# Altium schematic symbol library Centralize.SchLib: 1081 symbols (part 15 of 26)
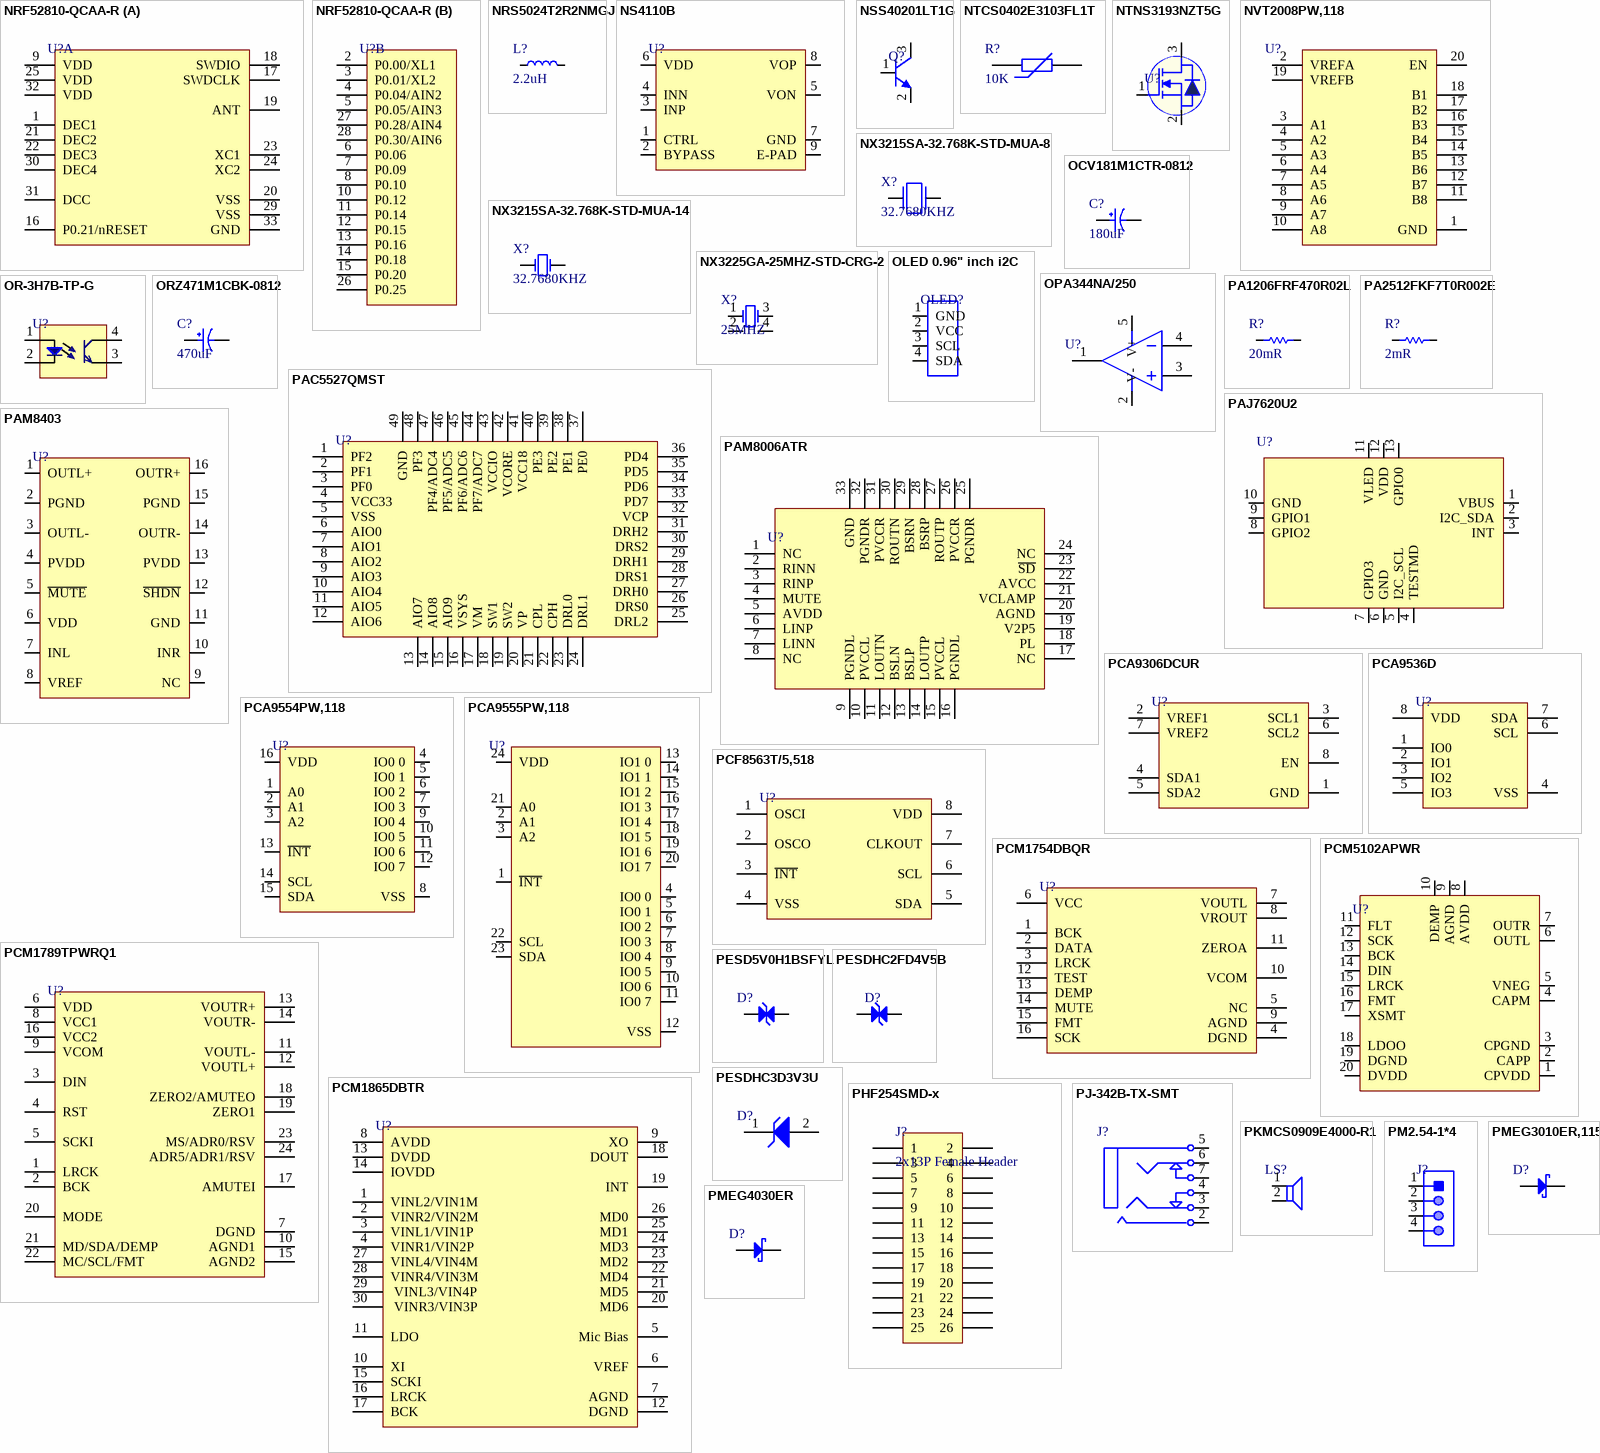
[diagram p61: symbols NRF52810-QCAA-R to PMEG4030ER]

## PCA9555PW,118
designator U?
IC XPND 400KHZ I2C SMBUS 24TSSOP; Manufacturer: NXP Semiconductors; Manufacturer Part Number: PCA9555PW,118; Number of I/Os: 16; Interface: I2C,SMBus,Serial; Output Current: 50mA; Min Supply Voltage: 2.3V; Max Supply Voltage: 5.5V; Operating Supply Current: 135uA; Max Power Dissipation: 200mW; Output Voltage: 4.1V; Supply Current: 160mA; Supplier 1: Arrow Electronics; RoHS: Yes; Category: Interface ICs; Stock 1: 2500; Pricing 1: 2500=1.7266, 5000=1.3406, 10000=1.3272, 25000=1.3139, 30000=1.3008, 50000=1.2878 (USD); Mounting Technology: Surface Mount; Case/Package: TSSOP; Pins: 24; Min Operating Temperature: -40°C; Max Operating Temperature: 85°C; Packaging: Tape and Reel; Package Quantity: 1; Frequency: 400kHz; Clock Frequency: 400kHz; Series: -; Nominal Supply Voltage: 5.5V; Radiation Hardening: No; Reach SVHC Compliant: No; Lead Free: Lead Free; RoHS Compliant: Yes; ComponentLink1URL: https://datasheet.ciiva.com/15134/getdatasheetpartid-148982-15134333.pdf?src-supplier=Verical; ComponentLink1Description: https://datasheet.ciiva.com/15134/getdatasheetpartid-148982-15134333.pdf?src-supplier=Verical; ComponentLink2URL: https://datasheet.ciiva.com/1780/pca9555-1780068.pdf?src-supplier=Digi-Key; ComponentLink2Description: https://datasheet.ciiva.com/1780/pca9555-1780068.pdf?src-supplier=Digi-Key; ComponentLink3URL: https://datasheet.ciiva.com/1504/1090559-1504901.pdf?src-supplier=Farnell; ComponentLink3Description: https://datasheet.ciiva.com/1504/1090559-1504901.pdf?src-supplier=Farnell; ComponentLink4URL: https://datasheet.ciiva.com/1780/pca9555-1780069.pdf?src-supplier=Digi-Key; ComponentLink4Description: https://datasheet.ciiva.com/1780/pca9555-1780069.pdf?src-supplier=Digi-Key; ComponentLink5URL: https://datasheet.ciiva.com/1780/pca9555-1780070.pdf?src-supplier=Digi-Key; ComponentLink5Description: https://datasheet.ciiva.com/1780/pca9555-1780070.pdf?src-supplier=Digi-Key; ComponentLink6URL: https://datasheet.ciiva.com/1495/1090559-1495945.pdf?src-supplier=Element14; ComponentLink6Description: https://datasheet.ciiva.com/1495/1090559-1495945.pdf?src-supplier=Element14; ComponentLink7URL: https://datasheet.ciiva.com/8122/pca9555-8122281.pdf?src-supplier=Avnet; ComponentLink7Description: https://datasheet.ciiva.com/8122/pca9555-8122281.pdf?src-supplier=Avnet; ComponentLink8URL: https://datasheet.ciiva.com/46381/1090559-46381881.pdf?src-supplier=Element14; ComponentLink8Description: https://datasheet.ciiva.com/46381/1090559-46381881.pdf?src-supplier=Element14; ComponentLink9URL: https://datasheet.ciiva.com/4826/pca9555-4826810.pdf?src-supplier=Mouser; ComponentLink9Description: https://datasheet.ciiva.com/4826/pca9555-4826810.pdf?src-supplier=Mouser; Supplier Part Number 1: PCA9555PW,118; LCSC Part Number: C128392; Item Type: IC
footprint 24-TSSOP_
pins: 1 ~{INT}, 2 A1, 3 A2, 4 IO0 0, 5 IO0 1, 6 IO0 2, 7 IO0 3, 8 IO0 4, 9 IO0 5, 10 IO0 6, 11 IO0 7, 12 VSS, 13 IO1 0, 14 IO1 1, 15 IO1 2, 16 IO1 3, 17 IO1 4, 18 IO1 5, 19 IO1 6, 20 IO1 7, 21 A0, 22 SCL, 23 SDA, 24 VDD

## PCF8563T/5,518
designator U?
IC RTC CLK/CALENDAR I2C 8-SOIC; Manufacturer: NXP Semiconductors; Manufacturer Part Number: PCF8563T/5,518; Time Format: HH:MM:SS; Max Supply Voltage: 5.5V; Min Supply Voltage: 1.8V; Logic Function: Clock; Supplier 1: Newark; RoHS: Yes; Category: Interface ICs; Pricing 1: 1=1.20000, 10=1.07000, 25=1.01000, 50=0.92400, 100=0.83300, 250=0.77800, 500=0.69000 (USD); Mount: Surface Mount; Case/Package: SO; Number of Pins: 8; Contact Plating: Gold; Min Operating Temperature: -40°C; Max Operating Temperature: 85°C; Packaging: Tape and Reel; Interface: I2C; Package Quantity: 2500; Supply Voltage-Nom: 5.5V; Radiation Hardening: No; Lead Free: Lead Free; Temperature Grade: INDUSTRIAL; RoHS Compliant: Yes; ComponentLink1URL: https://datasheet.ciiva.com/1238/pcf8563-1238728.pdf?src-supplier=Digi-Key; ComponentLink1Description: https://datasheet.ciiva.com/1238/pcf8563-1238728.pdf?src-supplier=Digi-Key; ComponentLink2URL: https://datasheet.ciiva.com/1238/pcf8563-1238727.pdf?src-supplier=Digi-Key; ComponentLink2Description: https://datasheet.ciiva.com/1238/pcf8563-1238727.pdf?src-supplier=Digi-Key; ComponentLink3URL: https://datasheet.ciiva.com/1238/pcf8563-1238773.pdf?src-supplier=Digi-Key; ComponentLink3Description: https://datasheet.ciiva.com/1238/pcf8563-1238773.pdf?src-supplier=Digi-Key; ComponentLink4URL: https://datasheet.ciiva.com/8145/pcf8563-8145180.pdf?src-supplier=Avnet; ComponentLink4Description: https://datasheet.ciiva.com/8145/pcf8563-8145180.pdf?src-supplier=Avnet; ComponentLink5URL: https://datasheet.ciiva.com/16287/pcf8563-16287110.pdf?src-supplier=Future+Electronics; ComponentLink5Description: https://datasheet.ciiva.com/16287/pcf8563-16287110.pdf?src-supplier=Future+Electronics; Supplier Part Number 1: 31AC6855; Item Type: IC
footprint SOIC-8
pins: 1 OSCI, 2 OSCO, 3 ~{INT}, 4 VSS, 5 SDA, 6 SCL, 7 CLKOUT, 8 VDD

## PCM1754DBQR
designator U?
IC DAC/AUDIO 24BIT 200K 16SSOP; Manufacturer: Texas Instruments; Manufacturer Part Number: PCM1754DBQR; Number of DAC Channels: 2; Operating Supply Voltage: 5V; Max Power Dissipation: 105mW; Interface: Serial,3-WIRE; Number of Bits: 24; Sampling Rate: 192000S/s; Resolution: 24b; Signal to Noise Ratio (SNR): 106dB; Supply Type: Single; Conversion Rate: 192KS/s; Nominal Supply Current: 30mA; Power Consumption: 80mW; Number of Analog Inputs: 0; Output Type: Voltage; Min Supply Voltage: 4.5V; Max Supply Voltage: 5.5V; Integral Nonlinearity (INL): 0.5LSB; Polarity: Bipolar; Supplier 1: Mouser; RoHS: Yes; Category: Amplifiers - Audio; Stock 1: 908; Pricing 1: 1=2.14000, 10=1.93000, 25=1.82000, 50=1.82000, 100=1.55000, 250=1.46000, 500=1.28000, 1000=1.06000, 10000=1.06000 (USD); Mount: Surface Mount; Case/Package: SSOP; Number of Pins: 16; Weight: 0.002603oz; Contact Plating: Gold; Min Operating Temperature: -40°C; Max Operating Temperature: 85°C; Packaging: Tape and Reel; Number of Channels: 2; Package Quantity: 2000; Number of Converters: 2; Number of Analog Outputs: 2; Series: PCM1754; Output Polarity: Bipolar; Length: 5mm; Width: 4mm; Height: 1.5mm; Radiation Hardening: No; Lead Free: Lead Free; RoHS Compliant: Yes; ComponentLink1URL: https://datasheet.ciiva.com/41460/001186173-da-01-en-ic-dac-24bit-mon-pcm1754dbqr-ssop-16-tid-41460109.pdf?src-supplier=Conrad; ComponentLink1Description: https://datasheet.ciiva.com/41460/001186173-da-01-en-ic-dac-24bit-mon-pcm1754dbqr-ssop-16-tid-41460109.pdf?src-supplier=Conrad; ComponentLink2URL: https://datasheet.ciiva.com/1388/pcm1753-1388404.pdf?src-supplier=Digi-Key; ComponentLink2Description: https://datasheet.ciiva.com/1388/pcm1753-1388404.pdf?src-supplier=Digi-Key; ComponentLink3URL: https://datasheet.ciiva.com/1388/pcm1753-1388403.pdf?src-supplier=Digi-Key; ComponentLink3Description: https://datasheet.ciiva.com/1388/pcm1753-1388403.pdf?src-supplier=Digi-Key; ComponentLink4URL: https://datasheet.ciiva.com/1388/pcm1753-1388405.pdf?src-supplier=Digi-Key; ComponentLink4Description: https://datasheet.ciiva.com/1388/pcm1753-1388405.pdf?src-supplier=Digi-Key; ComponentLink5URL: https://datasheet.ciiva.com/15146/getdatasheetpartid-213919-15146955.pdf?src-supplier=Verical; ComponentLink5Description: https://datasheet.ciiva.com/15146/getdatasheetpartid-213919-15146955.pdf?src-supplier=Verical; Supplier Part Number 1: 595-PCM1754DBQR; Item Type: IC
footprint 16-SSOP
pins: 1 BCK, 2 DATA, 3 LRCK, 4 DGND, 5 NC, 6 VCC, 7 VOUTL, 8 VROUT, 9 AGND, 10 VCOM, 11 ZEROA, 12 TEST, 13 DEMP, 14 MUTE, 15 FMT, 16 SCK

## PCM1789TPWRQ1
designator U?
IC DAC/AUDIO 24BIT 192K 24TSSOP; Manufacturer: Texas Instruments; Manufacturer Part Number: PCM1789TPWRQ1; Number of Channels: 2; Operating Supply Voltage: 5V; Min Supply Voltage: 4.5V; Max Supply Voltage: 5.5V; Interface: I2C,SPI,Serial,3-WIRE; Max Power Dissipation: 239mW; Number of Bits: 24; Resolution: 24b; Supply Type: Analog,Digital; Conversion Rate: 192KS/s; Power Consumption: 154mW; Number of Analog Inputs: 0; Output Type: Voltage; Supplier 1: Digi-Key; RoHS: Yes; Category: Amplifiers - Audio; Mount: Surface Mount; Case/Package: TSSOP; Number of Pins: 24; Min Operating Temperature: -40°C; Max Operating Temperature: 105°C; Packaging: Tape and Reel; Number of DAC Channels: 2; Package Quantity: 2000; Number of Converters: 2; Number of Analog Outputs: 2; Series: PCM1789-Q1; Lead Free: Lead Free; RoHS Compliant: Yes; ComponentLink1URL: https://datasheet.ciiva.com/1389/pcm1789-q1-1389256.pdf?src-supplier=Digi-Key; ComponentLink1Description: https://datasheet.ciiva.com/1389/pcm1789-q1-1389256.pdf?src-supplier=Digi-Key; ComponentLink2URL: https://datasheet.ciiva.com/14255/sbas546-14255107.pdf?src-supplier=Avnet; ComponentLink2Description: https://datasheet.ciiva.com/14255/sbas546-14255107.pdf?src-supplier=Avnet; Supplier Part Number 1: 296-28413-1-ND; LCSC Part Number: C2864058; Item Type: IC
footprint 24-TSSOP_
pins: 1 LRCK, 2 BCK, 3 DIN, 4 RST, 5 SCKI, 6 VDD, 7 DGND, 8 VCC1, 9 VCOM, 10 AGND1, 11 VOUTL-, 12 VOUTL+, 13 VOUTR+, 14 VOUTR-, 15 AGND2, 16 VCC2, 17 AMUTEI, 18 ZERO2/AMUTEO, 19 ZERO1, 20 MODE, 21 MD/SDA/DEMP, 22 MC/SCL/FMT, 23 MS/ADR0/RSV, 24 ADR5/ADR1/RSV

## PCM1865DBTR
designator U?
IC ADC/AUDIO 24BIT 192K 30TSSOP; Manufacturer: Texas Instruments; Manufacturer Part Number: PCM1865DBTR; Interface: I2C,SPI,Serial; Operating Supply Voltage: 3.3V; Sampling Rate: 192KS/s; Resolution: 24b; Operating Supply Current: 31mA; Supply Type: Single; Number of A/D Converters: 4; Power Consumption: 145mW; Max Supply Voltage: 3.6V; Min Supply Voltage: 3V; Number of Analog Inputs: 8; Number of DAC Channels: 0; Supplier 1: Mouser; RoHS: Yes; Category: Amplifiers - Audio; Pricing 1: 1=10.72000, 10=9.69000, 25=9.23000, 50=9.23000, 100=8.02000, 250=7.66000, 500=6.98000, 1000=6.54000, 10000=6.54000 (USD); Mount: Surface Mount; Case/Package: TSSOP; Number of Pins: 30; Weight: 0.003439oz; Contact Plating: Gold; Min Operating Temperature: -40°C; Max Operating Temperature: 125°C; Package Quantity: 2000; Packaging: Tape and Reel; Number of ADC Channels: 4; Lead Free: Lead Free; RoHS Compliant: Yes; ComponentLink1URL: https://datasheet.ciiva.com/48474/pcm1861-48474798.pdf?src-supplier=Avnet; ComponentLink1Description: https://datasheet.ciiva.com/48474/pcm1861-48474798.pdf?src-supplier=Avnet; ComponentLink2URL: https://datasheet.ciiva.com/29699/pcm1861-29699238.pdf?src-supplier=Digi-Key; ComponentLink2Description: https://datasheet.ciiva.com/29699/pcm1861-29699238.pdf?src-supplier=Digi-Key; Supplier Part Number 1: 595-PCM1865DBTR; LCSC Part Number: C181312
footprint TSSOP-30
pins: 1 VINL2/VIN1M, 2 VINR2/VIN2M, 3 VINL1/VIN1P, 4 VINR1/VIN2P, 5 Mic Bias, 6 VREF, 7 AGND, 8 AVDD, 9 XO, 10 XI, 11 LDO, 12 DGND, 13 DVDD, 14 IOVDD, 15 SCKI, 16 LRCK, 17 BCK, 18 DOUT, 19 INT, 20 MD6, 21 MD5, 22 MD4, 23 MD2, 24 MD3, 25 MD1, 26 MD0, 27 VINL4/VIN4M, 28 VINR4/VIN3M, 29  VINL3/VIN4P, 30  VINR3/VIN3P

## PCM5102APWR
designator U?
IC DAC 16/24/32BIT 384K 20TSSOP; Manufacturer: Texas Instruments; Manufacturer Part Number: PCM5102APWR; Supplier: Mouser; Supplier Part Number: 595-PCM5102APWR; RoHS: Yes; Category: Digital to Analog Converters (DACs); Stock: 2740; Pricing: 1=5.76, 10=4.87, 50=4.87, 100=4.1, 1000=3.13, 10000=2.65 (USD); ComponentLink1URL: https://datasheet.ciiva.com/24021/slas859a-261040-24021907.pdf?src-supplier=Mouser; ComponentLink1Description: https://datasheet.ciiva.com/24021/slas859a-261040-24021907.pdf?src-supplier=Mouser; ComponentLink2URL: https://datasheet.ciiva.com/29648/pcm5102a-29648362.pdf?src-supplier=Digi-Key; ComponentLink2Description: https://datasheet.ciiva.com/29648/pcm5102a-29648362.pdf?src-supplier=Digi-Key; ComponentLink3URL: https://datasheet.ciiva.com/6673/pcm5102a-6673611.pdf?src-supplier=Digi-Key; ComponentLink3Description: https://datasheet.ciiva.com/6673/pcm5102a-6673611.pdf?src-supplier=Digi-Key; LCSC Part Number: C107671; Item Type: IC
footprint TSSOP-20
pins: 1 CPVDD, 2 CAPP, 3 CPGND, 4 CAPM, 5 VNEG, 6 OUTL, 7 OUTR, 8 AVDD, 9 AGND, 10 DEMP, 11 FLT, 12 SCK, 13 BCK, 14 DIN, 15 LRCK, 16 FMT, 17 XSMT, 18 LDOO, 19 DGND, 20 DVDD

## PESD5V0H1BSFYL
designator D?
TVS DIODE 5VWM 6.3VC DSN0603-2; Manufacturer: Nexperia; Manufacturer Part Number: PESD5V0H1BSFYL; Supplier 1: Avnet; RoHS: Yes; Category: ESD and Circuit Protection ICs; Stock 1: 9000; Pricing 1: 18000=0.06453, 36000=0.06278, 54000=0.06104, 90000=0.05930, 180000=0.05755, 900000=0.05581, 1800000=0.05406 (USD); RoHS Compliant: Yes; ComponentLink1URL: http://www.farnell.com/datasheets/1961312.pdf?src-supplier=Farnell; ComponentLink1Description: http://www.farnell.com/datasheets/1961312.pdf?src-supplier=Farnell; ComponentLink2URL: https://assets.nexperia.com/documents/data-sheet/PESD5V0H1BSF.pdf?src-supplier=Digi-Key; ComponentLink2Description: https://assets.nexperia.com/documents/data-sheet/PESD5V0H1BSF.pdf?src-supplier=Digi-Key; ComponentLink3URL: http://www.farnell.com/datasheets/1961312.pdf?src-supplier=Newark; ComponentLink3Description: http://www.farnell.com/datasheets/1961312.pdf?src-supplier=Newark; Supplier Part Number 1: PESD5V0H1BSFYL; LCSC Part Number: C477989; Item Type: Diode
footprint DSN0603-2
pins: 1 A, 2 A

## PESDHC2FD4V5B
designator D?
12V 30A 4.5V Bi-Directional DFN1006 ESD Protection Devices ROHS; Manufacturer: Shanghai Prisemi Elec; Manufacturer Part Number: PESDHC2FD4V5B; Item Type: Diode; Package: DFN1006; LCSC Part Number: C110686; ComponentLink1Description: LCSC; ComponentLink1URL: https://www.lcsc.com/product-detail/ESD-Protection-Devices_Shanghai-Prisemi-Elec-PESDHC2FD4V5B_C110686.html
footprint DFN1006-2L_
pins: 1 A, 2 A

## PESDHC3D3V3U
designator D?
15A@8/20us 9V 5V 3.3V Unidirectional SOD-323 TVS ROHS; Manufacturer: Shanghai Prisemi Elec; Manufacturer Part Number: PESDHC3D3V3U; Item Type: Diode; Package: SOD-323; LCSC Part Number: C496538; ComponentLink1Description: LCSC; ComponentLink1URL: https://www.lcsc.com/product-detail/TVS_Shanghai-Prisemi-Elec-PESDHC3D3V3U_C496538.html
footprint SOD-323
pins: 1, 2

## PHF254SMD-x
designator J?, comment 2x13P Female Header
P=2.54mm Female Headers,SMD,ROHS; Manufacturer: RTLECS; Manufacturer Part Number: PHF254SMD-x; Value: Custom; Package: Custom; ComponentLink1Description: Aliexpress; ComponentLink1URL: https://vi.aliexpress.com/i/32798959899.html?gatewayAdapt=glo2vnm; Item Type: Header
footprint PHF254SMD-x_
pins: 1, 2, 3, 4, 5, 6, 7, 8, 9, 10, 11, 12, 13, 14, 15, 16, 17, 18, 19, 20, 21, 22, 23, 24, 25, 26

## PJ-342B-TX-SMT
designator J?
-20℃~+70℃ 3.5mm headphone jack 235℃ 12V 0.5A SMD Audio Connectors ROHS; Manufacturer: XKB Connectivity; Manufacturer Part Number: PJ-342B-TX-SMT; Footprint: Custom; ComponentLink1Description: LCSC; ComponentLink1URL: https://www.lcsc.com/product-detail/Audio-Connectors_XKB-Connectivity-PJ-342B-TX-SMT_C388632.html; LCSC Part Number: C388632
footprint PJ-342B-TX-SMT_
pins: 2, 3, 4, 5, 6, 7

## PKMCS0909E4000-R1
designator LS?
BUZZER PIEZO 1.5V 9X9MM SMD; Manufacturer: Murata; Manufacturer Part Number: PKMCS0909E4000-R1; Supplier: Rs; Supplier Part Number: 9010898P; RoHS: Yes; Category: Buzzers; Stock: 4400; Pricing: 50=0.646, 100=0.598, 250=0.55, 500=0.504 (GBP); ComponentLink1URL: https://datasheet.ciiva.com/24244/pkmcs0909e4000-r1-304946-24244386.pdf?src-supplier=Mouser; ComponentLink1Description: https://datasheet.ciiva.com/24244/pkmcs0909e4000-r1-304946-24244386.pdf?src-supplier=Mouser; Item Type: BUZZER
footprint PKMCS0909E4000-R1
pins: 1 +, 2 -

## PM2.54-1*4
designator J?
2mm 2.54mm Plugin 2.5A -40℃~+105℃ Straight 1x4P Top 8.5mm 4 Square Hole Plugin,P=2.54mm Female Headers ROHS; Manufacturer: ZHOURI; Manufacturer Part Number: PM2.54-1*4; Package: Plugin,P=2.54mm; LCSC Part Number: C5116530; Item Type: Female Header; ComponentLink1Description: LCSC; ComponentLink1URL: https://www.lcsc.com/product-detail/span-style-background-color-ff0-Female-span-Headers_ZHOURI-PM2-54-1-4_C5116530.html
footprint HDR1X4 Female
pins: 1, 2, 3, 4

## PMEG3010ER,115
designator D?
DIODE SCHOTTKY 30V 1A SOD123W; Manufacturer: Nexperia; Manufacturer Part Number: PMEG3010ER,115; Supplier 1: Digi-Key; Stock 1: 72983; Pricing 1: 1=0.35, 10=0.282, 25=0.258, 100=0.162, 250=0.1602, 500=0.15, 1000=0.102 (USD); Supplier Part Number 1: 1727-5201-1-ND; LCSC Part Number: C456106
footprint SOD-123W (DIODE SCHOTTKY 30V 1A SOD123W)
pins: 1 A, 2 K

## PMEG4030ER
designator D?
SOD-123FL Schottky Barrier Diodes (SBD) ROHS; Manufacturer: Shikues; Manufacturer Part Number: PMEG4030ER; Item Type: Diode; Package: SOD-123FL; LCSC Part Number: C5366303; ComponentLink1Description: LCSC; ComponentLink1URL: https://www.lcsc.com/product-detail/Schottky-Barrier-Diodes-SBD_Shikues-PMEG4030ER_C5366303.html
footprint SOD-123FL
pins: 1 K, 2 A

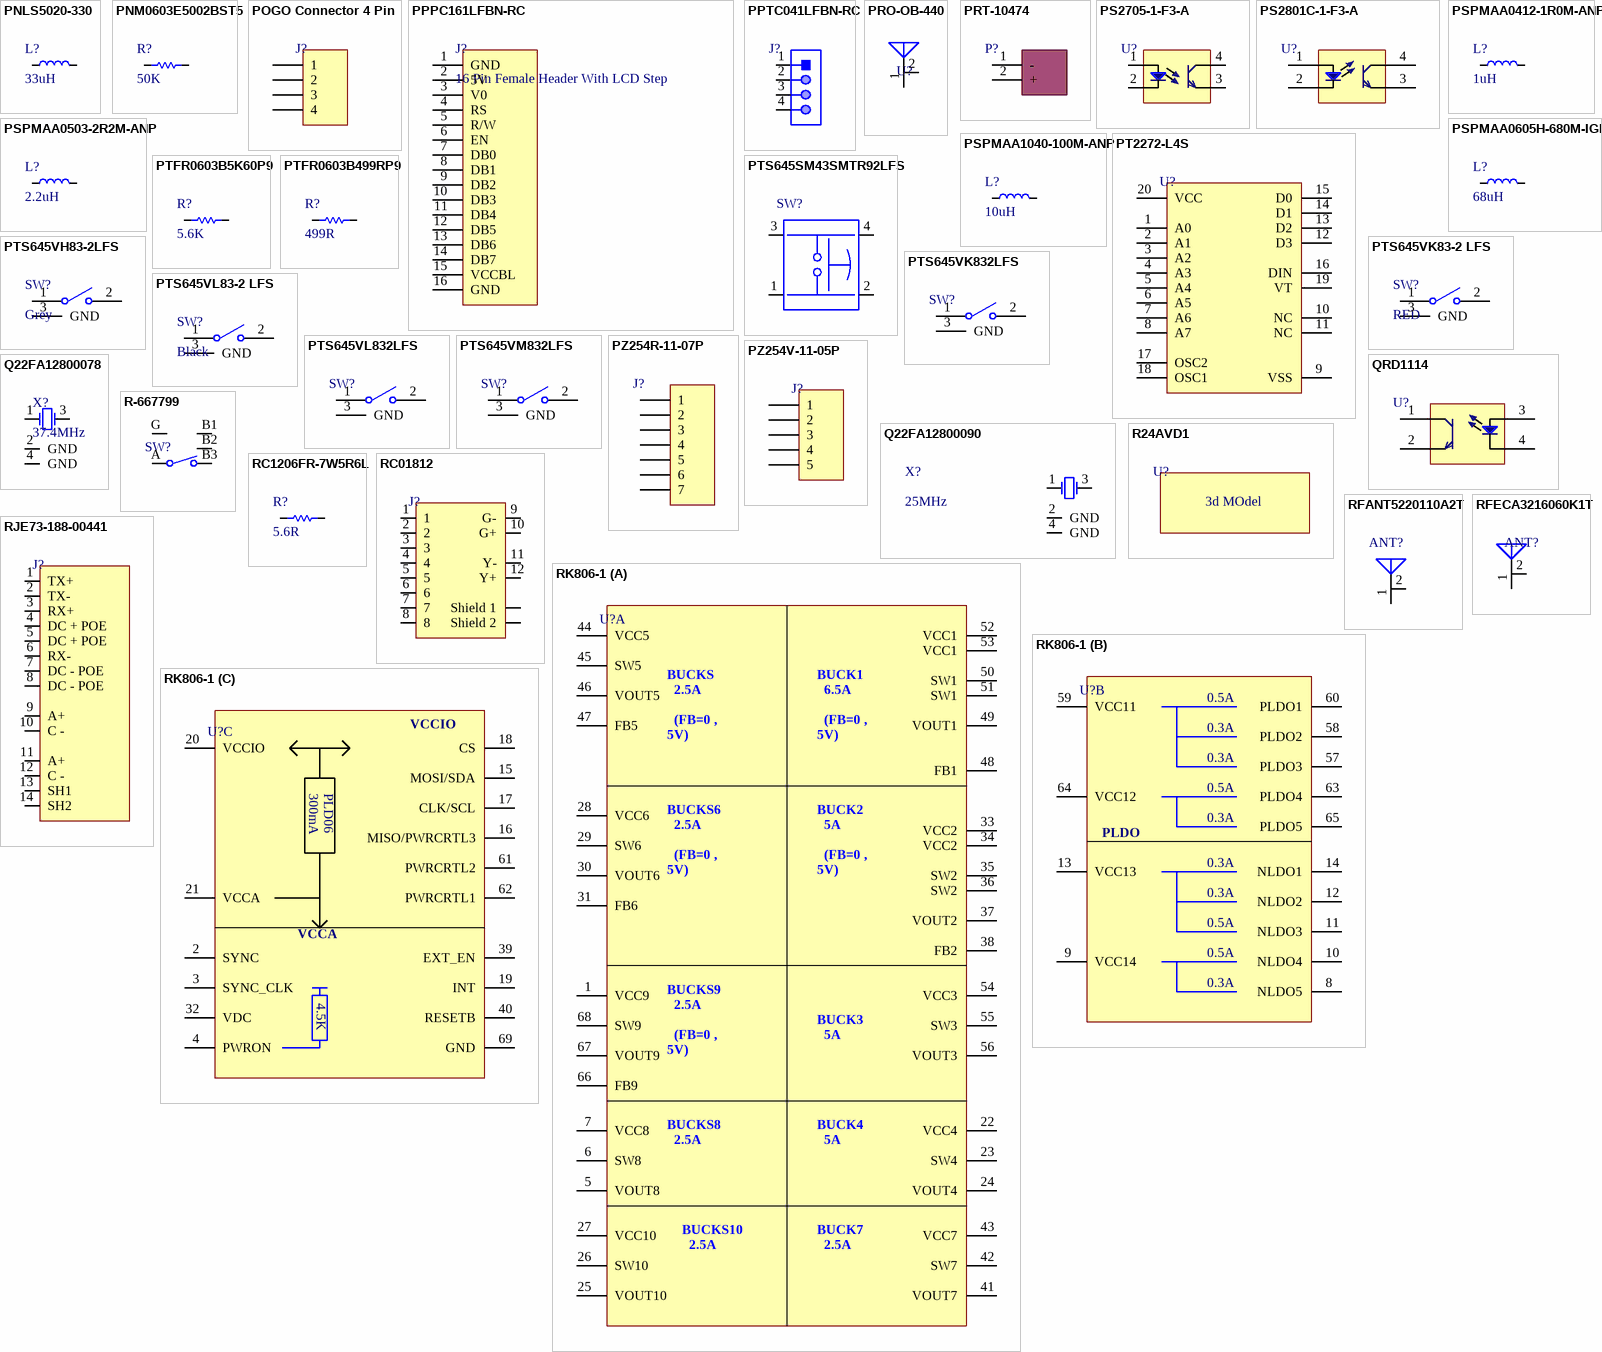
[diagram p19: symbols PNLS5020-330 to RK806-1]

## PNLS5020-330
designator L?, comment 33uH
1A 33uH ±20% 356mΩ SMD,5x5x2mm Power Inductors ROHS; Manufacturer: DMBJ; Manufacturer Part Number: PNLS5020-330; Footprint: Custom; ComponentLink1Description: LCSC; ComponentLink1URL: https://www.lcsc.com/product-detail/Power-Inductors_DMBJ-PNLS5020-330_C2849490.html; LCSC Part Number: C2849490
footprint PNLS5020-330
pins: 1, 2

## PNM0603E5002BST5
designator R?, comment 50K
RES SMD 50K OHM 0.1% 0.15W 0603; Manufacturer: Vishay Dale Thin Film; Manufacturer Part Number: PNM0603E5002BST5; Resistance: 50kR; Temperature Coefficient: 25ppm/°C; Power Rating: 150mW; Voltage Rating: 75V; Supplier 1: Digi-Key; Stock 1: 16518; Pricing 1: 1=3.07, 10=2.743, 100=2.0299 (USD); Case/Package: 0603; Contact Plating: Copper,Tin,Silver; Case Code (Imperial): 0603; Case Code (Metric): 1608; Min Operating Temperature: -55°C; Max Operating Temperature: 125°C; Tolerance: 0.1%; Composition: Thin Film; Packaging: Tape and Reel; Termination: SMD/SMT; Voltage Rating (DC): 75V; Length: 0.064inch; Height: 0.02inch; Width: 0.032inch; Radiation Hardening: No; REACH SVHC: Unknown; Supplier Part Number 1: PNM0603-50KBDKR-ND; LCSC Part Number: C2073717; ComponentLink1Description: LCSC; ComponentLink1URL: https://www.lcsc.com/product-detail/Chip-Resistor-Surface-Mount_Vishay-Intertech-PNM0603E5002BST5_C2073717.html
footprint Res-0603
pins: 1, 2

## POGO Connector 4 Pin
designator J?
Pogo Pad 2.5mm 4 Pin; Manufacturer Part Number: POGO Connector 4 Pin; Item Type: Pogo Connector
footprint Pogo 4 Pin
pins: 1, 2, 3, 4

## PPPC161LFBN-RC
designator J?, comment 16 Pin Female Header With LCD Step
CONN HDR 16POS 0.1 GOLD PCB; Manufacturer: Sullins; Manufacturer Part Number: PPPC161LFBN-RC; Number of Positions: 16; Connector Type: Header,Socket; Pitch: 0.1inch; Supplier 1: Digi-Key; Stock 1: 6865; Pricing 1: 1=1.02, 10=0.897, 100=0.7742, 500=0.63342, 1000=0.56304, 5000=0.5083 (USD); Mount: Through Hole; Color: Black; Contact Plating: Gold; Contact Material: Bronze; Housing Material: Plastic; Package Quantity: 1000; Number of Rows: 1; Packaging: Bulk; Termination: Solder; Length: 41.1mm; Height: 8.5mm; Width: 2.5mm; Lead Free: Lead Free; Supplier Part Number 1: S7049-ND; LCSC Part Number: C3322257; ComponentLink1Description: LCSC; ComponentLink1URL: https://www.lcsc.com/product-detail/Female-Headers_Sullins-Connector-Solutions-PPPC161LFBN-RC_C3322257.html
footprint PPPC161LFBN-RC_ (CONN HDR 16POS 0.1 GOLD PCB)
pins: 1 GND, 2 5V, 3 V0, 4 RS, 5 R/W, 6 EN, 7 DB0, 8 DB1, 9 DB2, 10 DB3, 11 DB4, 12 DB5, 13 DB6, 14 DB7, 15 VCCBL, 16 GND

## PPTC041LFBN-RC
designator J?
CONN HEADER FEMALE 4POS .1 TIN; Manufacturer: Sullins; Manufacturer Part Number: PPTC041LFBN-RC; Number of Positions: 4; Voltage Rating: 250V; Pitch: 2.54mm; Supplier 1: Future Electronics; RoHS: Yes; Category: Connectors; Stock 1: 915; Pricing 1: 1=0.28500, 150=0.27500, 400=0.26500, 1500=0.25500, 4000=0.23500 (USD); Mounting Technology: Through Hole; Contact Material: Bronze; Housing Material: Plastic; Contact Finish - Mating: TIN; Insulation Color: Black; Insulation Material: Polyester; Contact Shape: Square; Min Operating Temperature: -40°C; Max Operating Temperature: 105°C; Number of Rows: 1; Packaging: Tray; Termination: Solder; Connector Type: Header; Contact Type: Female Socket; Fastening Type: Pull; Series: -; Length: 10.7mm; Width: 2.5mm; Height: 8.5mm; Lead Free: Lead Free; RoHS Compliant: Yes; Flammability Rating: UL94 V-0; ComponentLink1URL: https://media.digikey.com/pdf/Data%20Sheets/Sullins%20PDFs/Female_Headers.100_DS.pdf?src-supplier=Digi-Key; ComponentLink1Description: https://media.digikey.com/pdf/Data%20Sheets/Sullins%20PDFs/Female_Headers.100_DS.pdf?src-supplier=Digi-Key; ComponentLink2URL: http://www.sullinscorp.com/catalogs/78_Page80-81_HEADER_.100_2.54mm_FEMALE.pdf?src-supplier=Future+Electronics; ComponentLink2Description: http://www.sullinscorp.com/catalogs/78_Page80-81_HEADER_.100_2.54mm_FEMALE.pdf?src-supplier=Future+Electronics; Supplier Part Number 1: 7137813; LCSC Part Number: C3319639; Item Type: Header
footprint HDR1X4 Female
pins: 1, 2, 3, 4

## PRO-OB-440
designator U?
RF ANT 2.4GHZ STAMPED MET SLD; Manufacturer: Proant; Manufacturer Part Number: PRO-OB-440; Number of Bands: 1; Return Loss: -10dB; Supplier 1: Digi-Key; Stock 1: 23502; Pricing 1: 1=0.74, 10=0.647, 25=0.608, 100=0.4964, 250=0.46104, 500=0.39238 (USD); Mount: Surface Mount; Packaging: Cut Tape; Termination: Solder; ComponentLink1URL: https://media.digikey.com/pdf/Data%20Sheets/Proant%20PDF's/PRO-OB-440_Dwg.PDF?src-supplier=Digi-Key; ComponentLink1Description: https://media.digikey.com/pdf/Data%20Sheets/Proant%20PDF's/PRO-OB-440_Dwg.PDF?src-supplier=Digi-Key; ComponentLink2URL: http://www.proant.se/files/user/Application%20note%20-%20OnBoard%20SMD%20GNSS%20rev%202.0.pdf?src-supplier=Digi-Key; ComponentLink2Description: http://www.proant.se/files/user/Application%20note%20-%20OnBoard%20SMD%20GNSS%20rev%202.0.pdf?src-supplier=Digi-Key; ComponentLink3URL: http://www.proant.se/files/user/Documents/Datasheet%20-%20OnBoard%20SMD%202400%20MHz%20rev%203.pdf?src-supplier=Digi-Key; ComponentLink3Description: http://www.proant.se/files/user/Documents/Datasheet%20-%20OnBoard%20SMD%202400%20MHz%20rev%203.pdf?src-supplier=Digi-Key; Supplier Part Number 1: 1532-1001-6-ND
footprint PRO-OB-440_ (RF ANT 2.4GHZ STAMPED MET SLD)
pins: 1 A, 2 A, 3 A hidden, 4 A hidden

## PRT-10474
designator P?
XT60 CONNECTORS MALE/FEMALE PAIR; Manufacturer: SparkFun; Manufacturer Part Number: PRT-10474; Supplier 1: Digi-Key; RoHS: No; Stock 1: 3234; Pricing 1: 1=1.50000 (USD); ComponentLink1URL: https://cdn.sparkfun.com/datasheets/Prototyping/xt60.pdf?src-supplier=Digi-Key; ComponentLink1Description: https://cdn.sparkfun.com/datasheets/Prototyping/xt60.pdf?src-supplier=Digi-Key; Supplier Part Number 1: 1568-1816-ND
footprint PRT-10474
pins: 1 -, 2 +

## PS2705-1-F3-A
designator U?
Optocoupler, Transistor, 3.75Kv, Sop-4 Rohs Compliant: Yes; Manufacturer: Renesas; Manufacturer Part Number: PS2705-1-F3-A; Number of Channels: 1; Max Power Dissipation: 150mW; Max Collector Current: 80mA; Collector Emitter Voltage (VCEO): 40V; Collector Emitter Saturation Voltage: 300mV; Forward Voltage: 1.4V; Max Input Current: 50mA; Rise Time: 3us; Current Transfer Ratio: 300%; Input Type: AC; Supplier 1: Digi-Key; RoHS: Yes; Category: Optocouplers; Stock 1: 58368; Pricing 1: 1=0.99000, 10=0.64600, 100=0.42290, 1000=0.35070 (USD); Mount: Surface Mount; Case/Package: SOP; Number of Pins: 4; Min Operating Temperature: -55°C; Max Operating Temperature: 100°C; Isolation Voltage: 3.75kV; Packaging: Tape and Reel; Number of Circuits: 1; Output Voltage: 40V; Number of Elements: 1; Forward Current: 50mA; Power Dissipation: 150mW; Radiation Hardening: No; Lead Free: Lead Free; RoHS Compliant: Yes; ComponentLink1URL: https://datasheet.ciiva.com/15119/getdatasheetpartid-627104-15119353.pdf?src-supplier=Verical; ComponentLink1Description: https://datasheet.ciiva.com/15119/getdatasheetpartid-627104-15119353.pdf?src-supplier=Verical; Supplier Part Number 1: 559-1030-1-ND; LCSC Part Number: C367377; Item Type: Optocoupler
footprint SOP-4_2.54
pins: 1 An, 2 Ca, 3 E, 4 C

## PS2801C-1-F3-A
designator U?
TransistorOptocouplers DC 1 2500Vrms SOP-4_P1.27 Optocouplers RoHS; Manufacturer: RENESAS; Manufacturer Part Number: PS2801C-1-F3-A; Footprint: SOP-4_1.27; ComponentLink1Description: LCSC; ComponentLink1URL: https://www.lcsc.com/product-detail/Optocouplers-Phototransistor-Output_RENESAS-PS2801C-1-F3-A_C67112.html; LCSC Part Number: C67112
footprint SOP-4_1.27
pins: 1 An, 2 Ca, 3 E, 4 C

## PSPMAA0412-1R0M-ANP
designator L?, comment 1uH
4.5A 1uH ±20% 70mΩ 5.5A SMD,4.2x4.4x1.2mm Power Inductors ROHS; Manufacturer: PROD Tech; Manufacturer Part Number: PSPMAA0412-1R0M-ANP; ComponentLink1Description: LCSC; ComponentLink1URL: https://lcsc.com/product-detail/Power-Inductors_PROD-Tech-PSPMAA0412-1R0M-ANP_C705331.html; Footprint: Custom; LCSC Part Number: C705331
footprint PSPMAA0412-1R0M-ANP_ (IND SMD 1uH)
pins: 1, 2

## PSPMAA0503-2R2M-ANP
designator L?, comment 2.2uH
5.5A 2.2uH ±20% 7.5A SMD,5.2x5.4x3mm Power Inductors ROHS; Manufacturer: PROD Tech; Manufacturer Part Number: PSPMAA0503-2R2M-ANP; Package: SMD,5.2x5.4x3mm; LCSC Part Number: C436533; Item Type: Inductor; ComponentLink1Description: LCSC; ComponentLink1URL: https://www.lcsc.com/product-detail/Power-Inductors_PROD-Tech-PSPMAA0503-2R2M-ANP_C436533.html
footprint PSPMAA0503-2R2M-ANP
pins: 1, 2

## PSPMAA0605H-680M-IGF
designator L?, comment 68uH
2A 68uH ±20% 2.5A SMD,6.6x7.1mm Power Inductors ROHS; Manufacturer: PROD Tech; Manufacturer Part Number: PSPMAA0605H-680M-IGF; Package: SMD,6.6x7.1mm; LCSC Part Number: C2983094; Item Type: Inductor; ComponentLink1Description: LCSC; ComponentLink1URL: https://www.lcsc.com/product-detail/Power-Inductors_PROD-Tech-PSPMAA0605H-680M-IGF_C2983094.html
footprint PSPMAA0605H-680M-IGF
pins: 1, 2

## PSPMAA1040-100M-ANP
designator L?, comment 10uH
7A 10uH ±20% 10A SMD,10.3x10.5mm Power Inductors ROHS; Manufacturer: PROD Tech; Manufacturer Part Number: PSPMAA1040-100M-ANP; Package: SMD,10.3x10.5mm; LCSC Part Number: C2983105; Item Type: Inductor; ComponentLink1Description: LCSC; ComponentLink1URL: https://www.lcsc.com/product-detail/Power-Inductors_PROD-Tech-PSPMAA1040-100M-ANP_C2983105.html
footprint PSPMAA1040-100M-ANP
pins: 1, 2

## PT2272-L4S
designator U?
SOP-20_300mil Interface - Specialized ROHS; Manufacturer: PTC; Manufacturer Part Number: PT2272-L4S; LCSC Part Number: C80963; ComponentLink1Description: LCSC; ComponentLink1URL: https://www.lcsc.com/product-detail/Interface-Specialized_PTC-Princeton-Tech-PT2272-L4S_C80963.html
footprint SOP-20 (300 Mil)
pins: 1 A0, 2 A1, 3 A2, 4 A3, 5 A4, 6 A5, 7 A6, 8 A7, 9 VSS, 10 NC, 11 NC, 12 D3, 13 D2, 14 D1, 15 D0, 16 DIN, 17 OSC2, 18 OSC1, 19 VT, 20 VCC

## PTFR0603B5K60P9
designator R?, comment 5.6K
100mW Thin Film Resistor 100V 5.6kΩ 0603 Chip Resistor; Manufacturer: Resistor.Today; Manufacturer Part Number: PTFR0603B5K60P9; Package: 0603; LCSC Part Number: C351638; ComponentLink1Description: LCSC; ComponentLink1URL: https://lcsc.com/product-detail/Chip-span-style-background-color-ff0-Resistor-span-Surface-Mount_span-style-background-color-ff0-Resistor-span-Today-PTFR0603B5K60P9_C351638.html; Item Type: Resistor
footprint Res-0603
pins: 1, 2

## PTFR0603B499RP9
designator R?, comment 499R
100mW Thin Film Resistor 100V ±0.1% ±25ppm/℃ -55℃~+125℃ 499Ω 0603 Chip Resistor - Surface Mount ROHS; Manufacturer: Resistor.Today; Manufacturer Part Number: PTFR0603B499RP9; Footprint: 0603; ComponentLink1Description: LCSC; ComponentLink1URL: https://lcsc.com/product-detail/Chip-span-style-background-color-ff0-Resistor-span-Surface-Mount_span-style-background-color-ff0-Resistor-span-Today-PTFR0603B499RP9_C478882.html; LCSC Part Number: C478882
footprint Res-0603
pins: 1, 2

## PTS645SM43SMTR92LFS
designator SW?
SWITCH TACTILE SPST-NO 0.05A 12V; Manufacturer: ITT C&K; Manufacturer Part Number: PTS645SM43SMTR92LFS; ComponentLink5URL: https://www.lcsc.com/product-detail/Tactile-Switches_C-K-PTS645SM43SMTR92LFS_C221880.html; ComponentLink5Description: LCSC; Package: SMD-4P,6x6mm; LCSC Part Number: C221880; Item Type: Switch
footprint PTS645SM43SMTR92LFS_ (SWITCH TACTILE SPST-NO 0.05A 12V)
pins: 1, 2, 3, 4

## PTS645VH83-2LFS
designator SW?, comment Grey
SWITCH TACTILE SPST-NO 0.05A 12V; Manufacturer: ITT C&K; Manufacturer Part Number: PTS645VH83-2LFS; Mechanical Life: 100000Cycles; Actuator Material: Nylon,Polyamide,PA66; Operating Force: 1.96N; Throw Configuration: SPST; Max Current Rating: 50mA; Illumination Type: Non-Illuminated; Switch Function: Off-Mom; Actuator Type: Standard; Supplier 1: RSComponents; RoHS: Yes; Category: Tactile Switches; Stock 1: 1; Pricing 1: 1=168.53700 (USD); Mount: Through Hole; Contact Plating: Silver; Contact Material: Bronze; Color: Black; Min Operating Temperature: -20°C; Max Operating Temperature: 60°C; Packaging: Bulk; Max Voltage Rating (DC): 12V; Termination: PC Pins; Voltage Rating (DC): 12V; Current Rating: 50mA; Package Quantity: 1000; Orientation: Right Angle; Series: PTS645; Length: 8.5mm; Depth: 12.3mm; Radiation Hardening: No; Lead Free: Lead Free; RoHS Compliant: Yes; ComponentLink1URL: https://datasheet.ciiva.com/26930/getdatasheetpartid-759839-26930136.pdf?src-supplier=Verical; ComponentLink1Description: https://datasheet.ciiva.com/26930/getdatasheetpartid-759839-26930136.pdf?src-supplier=Verical; ComponentLink2URL: https://datasheet.ciiva.com/14920/pts645-14920698.pdf?src-supplier=Digi-Key; ComponentLink2Description: https://datasheet.ciiva.com/14920/pts645-14920698.pdf?src-supplier=Digi-Key; Supplier Part Number 1: 1359158; LCSC Part Number: C221889
footprint PTS645VH83-2LFS_
pins: 1, 2, 3 GND

## PTS645VK83-2 LFS
designator SW?, comment RED
SWITCH TACTILE SPST-NO 0.05A 12V; Manufacturer: ITT C&K; Manufacturer Part Number: PTS645VK83-2LFS; Mechanical Life: 100000Cycles; Actuator Material: Nylon,Polyamide,PA66; Operating Force: 260gf; Current Rating: 50mA; Illumination Type: Non-Illuminated; Throw Configuration: SPST; Switch Function: Off-Mom; Actuator Type: Standard; Supplier 1: Mouser; RoHS: Yes; Category: Tactile Switches; Stock 1: 15223; Pricing 1: 1=0.29000, 10=0.27900, 50=0.27400, 100=0.25800, 1000=0.17200, 10000=0.16500 (USD); Mount: Through Hole; Color: Black; Contact Plating: Silver; Min Operating Temperature: -20°C; Max Operating Temperature: 60°C; Package Quantity: 1000; Packaging: Bulk; Voltage Rating (DC): 12V; Termination: PC Pin; Max Current Rating: 50mA; Orientation: Right Angle; Series: PTS645; Length: 8.5mm; Depth: 12.3mm; Lead Free: Lead Free; RoHS Compliant: Yes; ComponentLink1URL: http://components.arrow.com/part/dataview/58497163S587771N9444?src-supplier=Arrow+Electronics; ComponentLink1Description: http://components.arrow.com/part/dataview/58497163S587771N9444?src-supplier=Arrow+Electronics; Supplier Part Number 1: 611-PTS645VK832; LCSC Part Number: C2798927
footprint PTS645VK83-2 LFS_
pins: 1, 2, 3 GND

## PTS645VK832LFS
designator SW?
Switch Tactile N.O. SPST Round Button PC Pins 0.05A 12VDC 100000Cycles 2.55N Bracket Mount/Through Hole Bulk; Manufacturer: ITT C&K; Manufacturer Part Number: PTS645VK83-2LFS; Actuator Material: Nylon,Polyamide,PA66; Operating Force: 260gf; Current Rating: 50mA; Voltage Rating (DC): 12V; Illumination Type: Non-Illuminated; Switch Function: Off-Mom; Actuator Type: Standard; Supplier 1: Mouser; RoHS: Yes; Category: Tactile Switches; Stock 1: 15223; Pricing 1: 1=0.29000, 10=0.27900, 50=0.27400, 100=0.25800, 1000=0.17200, 10000=0.16500 (USD); Mount: Through Hole; Color: Black; Contact Plating: Silver; Mechanical Life: 100000Cycles; Min Operating Temperature: -20°C; Max Operating Temperature: 60°C; Package Quantity: 1000; Packaging: Bulk; Termination: PC Pin; Throw Configuration: SPST; Max Current Rating: 50mA; Orientation: Right Angle; Series: PTS645; Length: 8.5mm; Depth: 12.3mm; Lead Free: Lead Free; RoHS Compliant: Yes; ComponentLink1URL: http://components.arrow.com/part/dataview/58497163S587771N9444?src-supplier=Arrow+Electronics; ComponentLink1Description: http://components.arrow.com/part/dataview/58497163S587771N9444?src-supplier=Arrow+Electronics; Supplier Part Number 1: 611-PTS645VK832
footprint PTS645VK832LFS_
pins: 1, 2, 3 GND

## PTS645VL83-2 LFS
designator SW?, comment Black
SWITCH TACTILE SPST-NO 0.05A 12V; Manufacturer: ITT C&K; Manufacturer Part Number: PTS645VL83-2LFS; Mechanical Life: 100000Cycles; Actuator Material: Nylon,Polyamide,PA66; Throw Configuration: SPST; Operating Force: 1.27N; Max Current Rating: 50mA; Illumination Type: Non-Illuminated; Switch Function: Off-Mom; Actuator Type: Standard; Supplier 1: Future Electronics; RoHS: Yes; Category: Tactile Switches; Stock 1: 29000; Pricing 1: 1000=0.17400, 2000=0.17000, 4000=0.16700, 5000=0.16600, 15000=0.15900 (USD); Mount: Through Hole; Contact Plating: Silver; Contact Material: Bronze; Color: Black; Min Operating Temperature: -20°C; Max Operating Temperature: 60°C; Packaging: Bulk; Max Voltage Rating (DC): 12V; Termination: PC Pins; Current Rating: 50mA; Voltage Rating (DC): 12V; Package Quantity: 1000; Orientation: Right Angle; Series: PTS645; Length: 7.5mm; Depth: 12.3mm; Radiation Hardening: No; Lead Free: Lead Free; RoHS Compliant: Yes; ComponentLink1URL: https://datasheet.ciiva.com/14920/pts645-14920695.pdf?src-supplier=Digi-Key; ComponentLink1Description: https://datasheet.ciiva.com/14920/pts645-14920695.pdf?src-supplier=Digi-Key; ComponentLink2URL: https://datasheet.ciiva.com/48483/pts645-48483566.pdf?src-supplier=Avnet; ComponentLink2Description: https://datasheet.ciiva.com/48483/pts645-48483566.pdf?src-supplier=Avnet; Supplier Part Number 1: 5057816; LCSC Part Number: C2798965
footprint PTS645VL83-2/LFS_
pins: 1, 2, 3 GND

## PTS645VL832LFS
designator SW?
SWITCH TACTILE SPST-NO 0.05A 12V; Manufacturer: ITT C&K; Manufacturer Part Number: PTS645VL83-2LFS; Mechanical Life: 100000Cycles; Actuator Material: Nylon,Polyamide,PA66; Throw Configuration: SPST; Operating Force: 1.27N; Max Current Rating: 50mA; Illumination Type: Non-Illuminated; Switch Function: Off-Mom; Actuator Type: Standard; Supplier 1: Future Electronics; RoHS: Yes; Category: Tactile Switches; Stock 1: 29000; Pricing 1: 1000=0.17400, 2000=0.17000, 4000=0.16700, 5000=0.16600, 15000=0.15900 (USD); Mount: Through Hole; Contact Plating: Silver; Contact Material: Bronze; Color: Black; Min Operating Temperature: -20°C; Max Operating Temperature: 60°C; Packaging: Bulk; Max Voltage Rating (DC): 12V; Termination: PC Pins; Current Rating: 50mA; Voltage Rating (DC): 12V; Package Quantity: 1000; Orientation: Right Angle; Series: PTS645; Length: 7.5mm; Depth: 12.3mm; Radiation Hardening: No; Lead Free: Lead Free; RoHS Compliant: Yes; ComponentLink1URL: https://datasheet.ciiva.com/14920/pts645-14920695.pdf?src-supplier=Digi-Key; ComponentLink1Description: https://datasheet.ciiva.com/14920/pts645-14920695.pdf?src-supplier=Digi-Key; ComponentLink2URL: https://datasheet.ciiva.com/48483/pts645-48483566.pdf?src-supplier=Avnet; ComponentLink2Description: https://datasheet.ciiva.com/48483/pts645-48483566.pdf?src-supplier=Avnet; Supplier Part Number 1: 5057816; LCSC Part Number: C285525
footprint PTS645VL832LFS_
pins: 1, 2, 3 GND

## PTS645VM832LFS
designator SW?
Blue SWITCH TACTILE SPST-NO 0.05A 12V; Manufacturer: ITT C&K; Manufacturer Part Number: PTS645VM83-2LFS; Mechanical Life: 100000Cycles; Actuator Material: Nylon,Polyamide,PA66; Operating Force: 1.57N; Current Rating: 50mA; Throw Configuration: SPST; Illumination Type: Non-Illuminated; Switch Function: Off-Mom; Actuator Type: Standard; Supplier 1: Mouser; RoHS: Yes; Category: Tactile Switches; Stock 1: 10398; Pricing 1: 1=0.32000, 10=0.30600, 50=0.28900, 100=0.25700, 1000=0.18100, 10000=0.17400 (USD); Mount: Through Hole; Color: Black; Contact Plating: Silver; Min Operating Temperature: -20°C; Max Operating Temperature: 60°C; Package Quantity: 1000; Packaging: Bulk; Voltage Rating (DC): 12V; Max Current Rating: 50mA; Termination: PC Pins; Orientation: Right Angle; Series: PTS645; Length: 7.5mm; Depth: 12.3mm; RoHS Compliant: Yes; ComponentLink1URL: https://datasheet.ciiva.com/26859/getdatasheetpartid-742303-26859307.pdf?src-supplier=Verical; ComponentLink1Description: https://datasheet.ciiva.com/26859/getdatasheetpartid-742303-26859307.pdf?src-supplier=Verical; Supplier Part Number 1: 611-PTS645VM832; LCSC Part Number: C285530
footprint PTS645VM832LFS_
pins: 1, 2, 3 GND

## PZ254R-11-07P
designator J?
Shrouded Square Pins 2.5mm 6mm -40℃~+105℃ 1 7 2.54mm Black Brass 1x7P Plugin,P=2.54mm Pin Headers ROHS; Manufacturer: XFCN; Manufacturer Part Number: PZ254R-11-07P; Footprint: Custom; ComponentLink1Description: LCSC; ComponentLink1URL: https://lcsc.com/product-detail/Pin-Headers_XFCN-PZ254R-11-07P_C492415.html; LCSC Part Number: C492415
footprint HDR1X7H_ (Connector; Header; 7 Position; Right Angle)
pins: 1, 2, 3, 4, 5, 6, 7

## PZ254V-11-05P
designator J?
Straight Square Pins 2.5mm 6mm -40℃~+105℃ 3mm 5 2.54mm 单排 Black Brass 1x5P Plugin,P=2.54mm Pin Headers ROHS; Manufacturer: XFCN; Manufacturer Part Number: PZ254V-11-05P; Item Type: Header; Package: Plugin,P=2.54mm; LCSC Part Number: C492404; ComponentLink1Description: LCSC; ComponentLink1URL: https://www.lcsc.com/product-detail/Pin-Headers_XFCN-PZ254V-11-05P_C492404.html
footprint HDR1X5_ (Connector; Header; 5 Position)
pins: 1, 2, 3, 4, 5

## Q22FA12800078
designator X?, comment 37.4MHz
37.4MHz SMD Crystal Resonator 9pF 60Ω ±10ppm -40℃~+85℃ SMD2016-4P Crystals; Manufacturer: Seiko; Manufacturer Part Number: Q22FA12800078; Footprint: Custom; ComponentLink1Description: LCSC; ComponentLink1URL: https://www.lcsc.com/product-detail/Crystals_Seiko-Epson-Q22FA12800078_C255897.html; LCSC Part Number: C255897
footprint Q22FA12800078_ (37.4MHz SMD Crystal Resonator 9pF 60O ±10ppm -40?~+85? SMD2016-4P Crystals)
pins: 1 OSC1, 2 GND, 3 OSC2, 4 GND

## Q22FA12800090
designator X?, comment 25MHz
CRYSTAL 25.0000MHZ 12PF SMD; Manufacturer: Seiko Epson; Manufacturer Part Number: Q22FA12800090; ComponentLink1Description: LCSC; ComponentLink1URL: https://www.lcsc.com/product-detail/Crystals_Seiko-Epson-Q22FA12800090_C255883.html; Package: SMD2016-4P; LCSC Part Number: C255883; Item Type: Crystal
footprint Q22FA12800090
pins: 1 OSC1, 2 GND, 3 OSC2, 4 GND

## QRD1114
designator U?
SENSR OPTO TRANS 1.27MM REFL PCB; Manufacturer: ON Semiconductor / Fairchild; Manufacturer Part Number: QRD1114; Wavelength: 940nm; Forward Current: 50mA; Rise Time: 10000ns; Forward Voltage: 1.7V; Collector Emitter Voltage (VCEO): 30V; Max Collector Current: 1mA; Fall Time: 50000ns; Output Type: Phototransistor; Number of Channels: 1; Reverse Breakdown Voltage: 5V; Response Time: 50us; Power Dissipation: 100mW; Input Current: 20mA; Supplier 1: Digi-Key; RoHS: Yes; Category: Optocouplers; Stock 1: 4356; Pricing 1: 1=1.64000, 5=1.58000, 10=1.28400, 25=1.10600, 50=0.95780, 100=0.86900, 500=0.73076, 1000=0.65175, 5000=0.59250 (USD); Mount: Through Hole; Number of Pins: 4; Weight: 0g; Contact Plating: Tin,Matte; Min Operating Temperature: -40°C; Max Operating Temperature: 85°C; Packaging: Bulk; Package Quantity: 100; Sensing Distance: 1.27mm; Reverse Voltage (DC): 5V; Collector Emitter Breakdown Voltage: 30V; Number of Elements: 1; Operating Supply Voltage: 1.7V; Max Power Dissipation: 100mW; Length: 6.1mm; Width: 4.39mm; Height: 4.65mm; Radiation Hardening: No; Lead Free: Lead Free; REACH SVHC: No SVHC; ComponentLink1URL: https://datasheet.ciiva.com/12069/qrd1114-192054-12069087.pdf?src-supplier=Mouser; ComponentLink1Description: https://datasheet.ciiva.com/12069/qrd1114-192054-12069087.pdf?src-supplier=Mouser; ComponentLink2URL: https://datasheet.ciiva.com/19453/874939-19453556.pdf?src-supplier=Jameco; ComponentLink2Description: https://datasheet.ciiva.com/19453/874939-19453556.pdf?src-supplier=Jameco; ComponentLink3URL: https://datasheet.ciiva.com/2823/qrd1113-2823879.pdf?src-supplier=Digi-Key; ComponentLink3Description: https://datasheet.ciiva.com/2823/qrd1113-2823879.pdf?src-supplier=Digi-Key; ComponentLink4URL: https://datasheet.ciiva.com/26165/qrd1113-26165833.pdf?src-supplier=Avnet+Europe; ComponentLink4Description: https://datasheet.ciiva.com/26165/qrd1113-26165833.pdf?src-supplier=Avnet+Europe; ComponentLink5URL: https://datasheet.ciiva.com/3305/qrd1113-3305733.pdf?src-supplier=Avnet; ComponentLink5Description: https://datasheet.ciiva.com/3305/qrd1113-3305733.pdf?src-supplier=Avnet; ComponentLink6URL: https://datasheet.ciiva.com/17088/qrd1113-17088344.pdf?src-supplier=Future+Electronics; ComponentLink6Description: https://datasheet.ciiva.com/17088/qrd1113-17088344.pdf?src-supplier=Future+Electronics; Supplier Part Number 1: QRD1114-ND; LCSC Part Number: C258245
footprint QRD1114_
pins: 1 C, 2 E, 3 An, 4 Ca

## R24AVD1
designator U?
R24AVD1 - Human Aware Radar Sensor, 90°/60°Sector Beam; Manufacturer: MicRadar; Item Type: Module; Manufacturer Part number: R24AVD1; Package: Custom; ComponentLink1Description: Datasheet; ComponentLink1URL: file:///C:/Users/Iftikhar%20Ahmed/Downloads/R24AVD1_Datasheet_V1.7.pdf
footprint R24AVD1
text: 3d MOdel

## R-667799
designator SW?
SWITCH TACTILE, SPST-NO, 0.05A 1; Manufacturer: Mitsumi; Manufacturer Part Number: R-667799; Item Type: Tactile Switch; Supplier: Digi-Key; Supplier Part Number: 2508-R-667799CT-ND; RoHS: No; Category: Tactile Switches; Stock: 11526; Pricing: 1=0.32, 10=0.31, 25=0.2944, 100=0.2666, 250=0.24304, 500=0.2259, 1000=0.19271, 2500=0.18736 (USD)
footprint R-667799
pins: A, B1, B2, B3, G

## RC1206FR-7W5R6L
designator R?, comment 5.6R
General Purpose Chip Resistor Thick Film 1206 5.6Ohm 1% Paper T/R; Manufacturer: Yageo; Manufacturer Part Number: RC1206FR-7W5R6L; Supplier 1: Avnet; RoHS: No; Category: Resistors; Pricing 1: 5000=0.02037, 10000=0.02008, 20000=0.01950 (USD); Supplier Part Number 1: RC1206FR-7W5R6L; LCSC Part Number: C137211; Item Type: Resistor
footprint Res-1206
pins: 1, 2

## RC01812
designator J?
RJ45 RJReceptacle 1 Yes Sink board WithLED -40℃~+70℃ SMD Ethernet Connectors/Modular Connectors (RJ45 RJ11) ROHS; Manufacturer: RCH; Manufacturer Part Number: RC01812; Package: SMD; LCSC Part Number: C708645; Item Type: Ethernet Connector; ComponentLink1Description: LCSC; ComponentLink1URL: https://www.lcsc.com/product-detail/Ethernet-Connectors-Modular-Connectors-RJ45-RJ11_RCH-RC01812_C708645.html
footprint RC01812
pins: 1, 2, 3, 4, 5, 6, 7, 8, 9 G-, 10 G+, 11 Y-, 12 Y+, Shield 1, Shield 2

## RFANT5220110A2T
designator ANT?
SMD,5.2x2x1.1mm Antennas ROHS; Manufacturer: Walsin Tech; Manufacturer Part Number: RFANT5220110A2T; ComponentLink1Description: LCSC; ComponentLink1URL: https://www.lcsc.com/product-detail/Antennas_Walsin-Tech-Corp-RFANT5220110A2T_C201761.html; Footprint: Custom; LCSC Part Number: C201761
footprint RFANT5220110A2T_
pins: 1 A, 2 NC

## RFECA3216060K1T
designator ANT?
1206 Antennas ROHS; Manufacturer: Walsin Tech Corp; Manufacturer Part Number: RFECA3216060K1T; ComponentLink1Description: LCSC; ComponentLink1URL: https://www.lcsc.com/product-detail/Antennas_Walsin-Tech-Corp-RFECA3216060K1T_C2992318.html; Footprint: 1206; LCSC Part Number: C2992318
footprint ANT-1206
pins: 1, 2

## RJE73-188-00441
designator J?
CONN MOD JACK 8P8C R/A SHIELDED; Manufacturer: Amphenol Commercial; Manufacturer Part Number: RJE73-188-00441; Gender: Female; Current Rating: 1A; Voltage Rating: 125V; Connector Type: Jack,RJ45; Number of Ports: 1; Direction: Down; Insulation Resistance: 500MR; Number of Contacts: 8; Item Type: Ethernet Connector; Supplier 1: Digi-Key; RoHS: Yes; Category: Connectors; Stock 1: 1188; Pricing 1: 1=3.16, 10=2.867, 25=2.7152, 50=2.652 (USD); Mounting Technology: Through Hole; Contact Plating: Gold; Contact Material: Bronze; Color: Black,Green,Yellow; Housing Material: Thermoplastic; Min Operating Temperature: -55°C; Max Operating Temperature: 85°C; Package Quantity: 1; Number of Rows: 1; Shielding: Shielded; Packaging: Tape and Reel; Termination: Through Hole; Number of Positions: 8; Series: RJE73; Flammability Rating: UL94 V-0; RoHS Compliant: Yes; Reach SVHC Compliant: Unknown; ComponentLink1URL: https://datasheet.ciiva.com/15372/rje7318800xxx-247724-15372477.pdf?src-supplier=Mouser; ComponentLink1Description: https://datasheet.ciiva.com/15372/rje7318800xxx-247724-15372477.pdf?src-supplier=Mouser; ComponentLink2URL: https://datasheet.ciiva.com/22726/1914870-22726118.pdf?src-supplier=Element14; ComponentLink2Description: https://datasheet.ciiva.com/22726/1914870-22726118.pdf?src-supplier=Element14; ComponentLink3URL: https://datasheet.ciiva.com/18452/70252835-18452663.pdf?src-supplier=Allied+Electronics; ComponentLink3Description: https://datasheet.ciiva.com/18452/70252835-18452663.pdf?src-supplier=Allied+Electronics; ComponentLink4URL: https://datasheet.ciiva.com/6948/p-rje73-188-00xxxdrawing-6948757.pdf?src-supplier=Digi-Key; ComponentLink4Description: https://datasheet.ciiva.com/6948/p-rje73-188-00xxxdrawing-6948757.pdf?src-supplier=Digi-Key; Supplier Part Number 1: RJE73-188-00441CT-ND
footprint RJE73-188-00441
pins: 1 TX+, 2 TX-, 3 RX+, 4 DC + POE, 5 DC + POE, 6 RX-, 7 DC - POE, 8 DC - POE, 9 A+, 10 C -, 11 A+, 12 C -, 13 SH1, 14 SH2

## RK806-1
designator U?
Power management integrated circuits; Manufacturer: ROCKCHIP; Manufacturer Part Number: RK806-1; Item Type: IC; Package: QFN68; LCSC Part Number: *; ComponentLink1Description: Rutronik; ComponentLink1URL: https://www.rutronik24.com/product/rockchip/rk806-1/17772765.html?emcs0=10&emcs1=null&emcs2=&emcs3=17772765
footprint 68-QFN-(7x7)
part A pins: 1 VCC9, 5 VOUT8, 6 SW8, 7 VCC8, 22 VCC4, 23 SW4, 24 VOUT4, 25 VOUT10, 26 SW10, 27 VCC10, 28 VCC6, 29 SW6, 30 VOUT6, 31 FB6, 33 VCC2, 34 VCC2, 35 SW2, 36 SW2, 37 VOUT2, 38 FB2, 41 VOUT7, 42 SW7, 43 VCC7, 44 VCC5, 45 SW5, 46 VOUT5, 47 FB5, 48 FB1, 49 VOUT1, 50 SW1, 51 SW1, 52 VCC1, 53 VCC1, 54 VCC3, 55 SW3, 56 VOUT3, 66 FB9, 67 VOUT9, 68 SW9
part B pins: 8 NLDO5, 9 VCC14, 10 NLDO4, 11 NLDO3, 12 NLDO2, 13 VCC13, 14 NLDO1, 57 PLDO3, 58 PLDO2, 59 VCC11, 60 PLDO1, 63 PLDO4, 64 VCC12, 65 PLDO5
part C pins: 2 SYNC, 3 SYNC_CLK, 4 PWRON, 15 MOSI/SDA, 16 MISO/PWRCRTL3, 17 CLK/SCL, 18 CS, 19 INT, 20 VCCIO, 21 VCCA, 32 VDC, 39 EXT_EN, 40 RESETB, 61 PWRCRTL2, 62 PWRCRTL1, 69 GND
part A text: BUCKS / 2.5A / (FB=0 , 5V); BUCK1 / 6.5A / (FB=0 , 5V); BUCKS6 / 2.5A / (FB=0 , 5V); BUCK2 / 5A / (FB=0 , 5V); BUCKS9 / 2.5A / (FB=0 , 5V); BUCK3 / 5A /; BUCKS8 / 2.5A /; BUCK4 / 5A; BUCKS10 / 2.5A; BUCK7 / 2.5A
part B text: 0.5A; 0.3A; PLDO
part C text: 300mA; PLD06; 4.5K

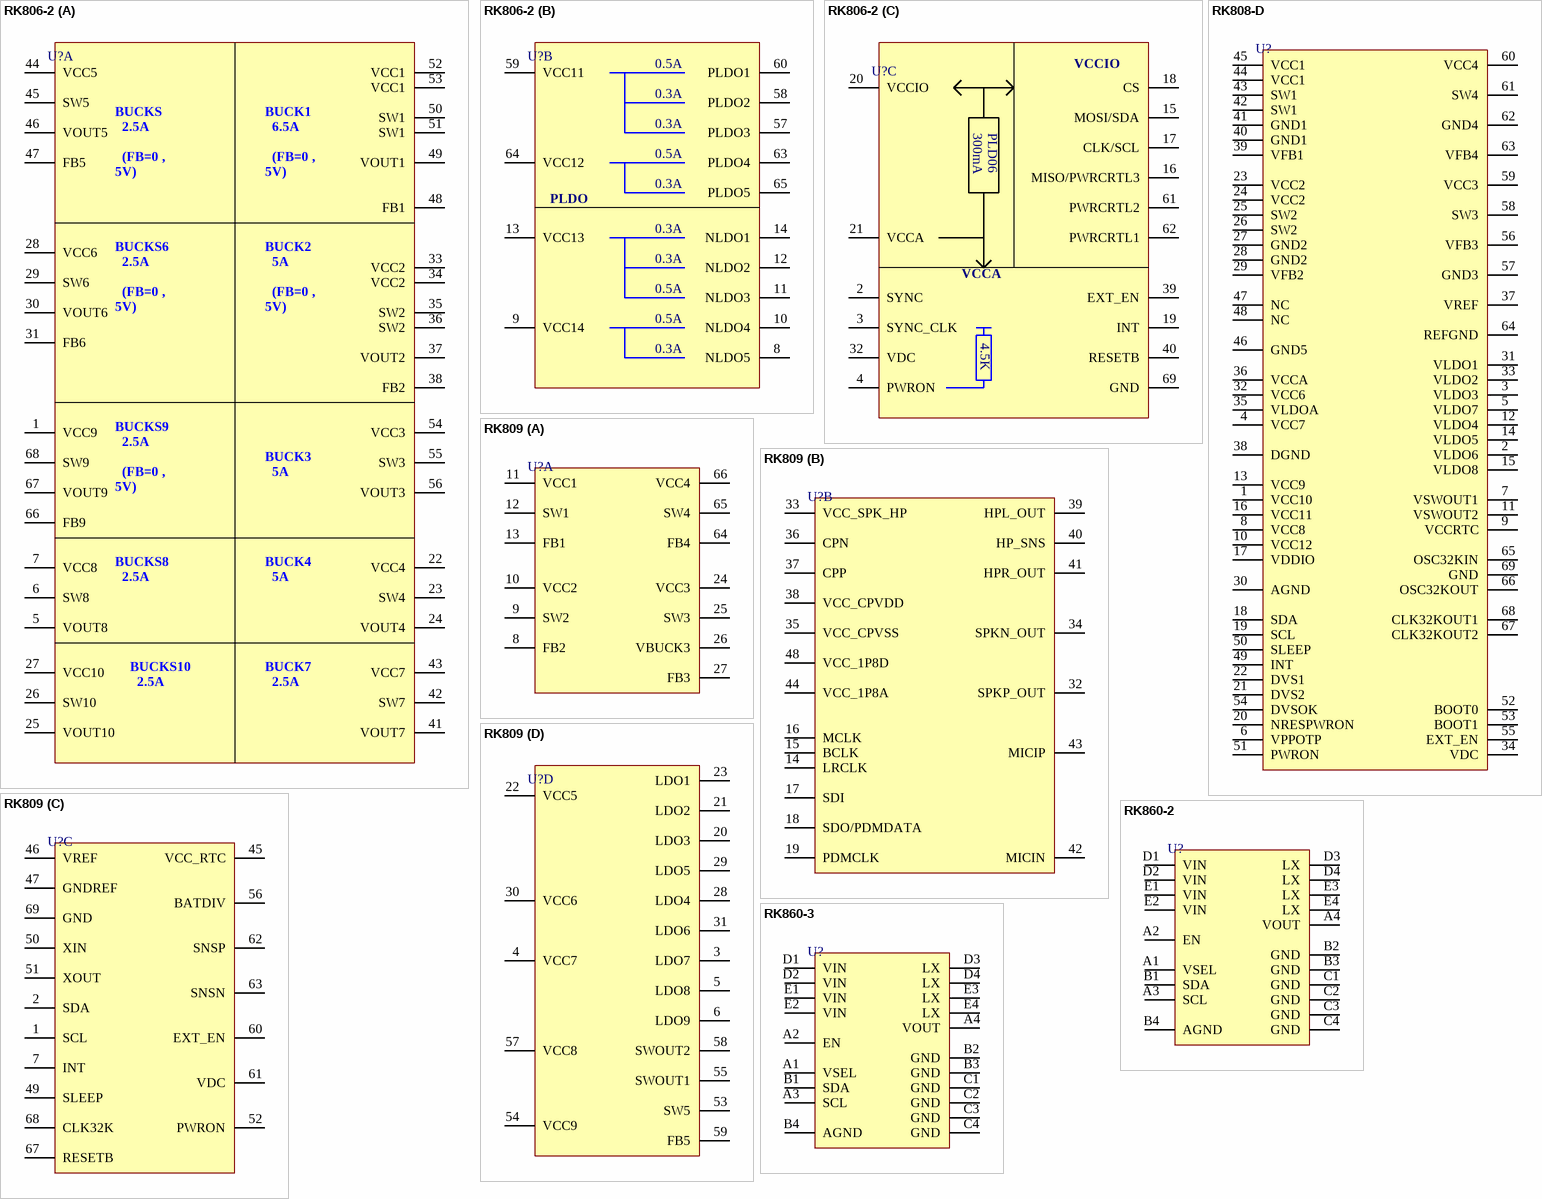
[diagram p20: symbols RK806-2 to RK860-3]

## RK806-2
designator U?
Power Management IC; Manufacturer: Rockchip; Manufacturer Part Number: RK806-2; Package: QFN-68 (7x7); LCSC Part Number: *; Item Type: IC; ComponentLink1Description: Rutronik; ComponentLink1URL: https://www.rutronik24.com/product/rockchip/rk806-1/17772765.html?emcs0=10&emcs1=null&emcs2=&emcs3=17772765
footprint 68-QFN-(7x7)
part A pins: 1 VCC9, 5 VOUT8, 6 SW8, 7 VCC8, 22 VCC4, 23 SW4, 24 VOUT4, 25 VOUT10, 26 SW10, 27 VCC10, 28 VCC6, 29 SW6, 30 VOUT6, 31 FB6, 33 VCC2, 34 VCC2, 35 SW2, 36 SW2, 37 VOUT2, 38 FB2, 41 VOUT7, 42 SW7, 43 VCC7, 44 VCC5, 45 SW5, 46 VOUT5, 47 FB5, 48 FB1, 49 VOUT1, 50 SW1, 51 SW1, 52 VCC1, 53 VCC1, 54 VCC3, 55 SW3, 56 VOUT3, 66 FB9, 67 VOUT9, 68 SW9
part B pins: 8 NLDO5, 9 VCC14, 10 NLDO4, 11 NLDO3, 12 NLDO2, 13 VCC13, 14 NLDO1, 57 PLDO3, 58 PLDO2, 59 VCC11, 60 PLDO1, 63 PLDO4, 64 VCC12, 65 PLDO5
part C pins: 2 SYNC, 3 SYNC_CLK, 4 PWRON, 15 MOSI/SDA, 16 MISO/PWRCRTL3, 17 CLK/SCL, 18 CS, 19 INT, 20 VCCIO, 21 VCCA, 32 VDC, 39 EXT_EN, 40 RESETB, 61 PWRCRTL2, 62 PWRCRTL1, 69 GND
part A text: BUCKS / 2.5A / (FB=0 , 5V); BUCK1 / 6.5A / (FB=0 , 5V); BUCKS6 / 2.5A / (FB=0 , 5V); BUCK2 / 5A / (FB=0 , 5V); BUCKS9 / 2.5A / (FB=0 , 5V); BUCK3 / 5A /; BUCKS8 / 2.5A /; BUCK4 / 5A; BUCKS10 / 2.5A; BUCK7 / 2.5A
part B text: 0.5A; 0.3A; PLDO
part C text: 300mA; PLD06; 4.5K

## RK808-D
designator U?
RK808 QFN68 K808 Power management chip; Manufacturer: Rockchip; Manufacturer Part Number: RK808-D; ComponentLink1Description: Aliexpress; ComponentLink1URL: https://www.aliexpress.com/item/4001077659208.html; Footprint: QFN68
footprint 68-QFN-(7x7)
pins: 1 VCC10, 2 VLDO6, 3 VLDO3, 4 VCC7, 5 VLDO7, 6 VPPOTP, 7 VSWOUT1, 8 VCC8, 9 VCCRTC, 10 VCC12, 11 VSWOUT2, 12 VLDO4, 13 VCC9, 14 VLDO5, 15 VLDO8, 16 VCC11, 17 VDDIO, 18 SDA, 19 SCL, 20 NRESPWRON, 21 DVS2, 22 DVS1, 23 VCC2, 24 VCC2, 25 SW2, 26 SW2, 27 GND2, 28 GND2, 29 VFB2, 30 AGND, 31 VLDO1, 32 VCC6, 33 VLDO2, 34 VDC, 35 VLDOA, 36 VCCA, 37 VREF, 38 DGND, 39 VFB1, 40 GND1, 41 GND1, 42 SW1, 43 SW1, 44 VCC1, 45 VCC1, 46 GND5, 47 NC, 48 NC, 49 INT, 50 SLEEP, 51 PWRON, 52 BOOT0, 53 BOOT1, 54 DVSOK, 55 EXT_EN, 56 VFB3, 57 GND3, 58 SW3, 59 VCC3, 60 VCC4, 61 SW4, 62 GND4, 63 VFB4, 64 REFGND, 65 OSC32KIN, 66 OSC32KOUT, 67 CLK32KOUT2, 68 CLK32KOUT1, 69 GND

## RK809
designator U?
RK809-5 Power Management IC; Manufacturer: Rockchip; Manufacturer Part Number: RK809; Package: QFN68 (7×7); ComponentLink1Description: Aliexpress; ComponentLink1URL: https://www.aliexpress.com/item/1005003629885820.html?spm=a2g0o.productlist.0.0.2bfe8de0NJNeYV&algo_pvid=08d8084f-c015-4db9-be0c-c1b5412e8db5&algo_exp_id=08d8084f-c015-4db9-be0c-c1b5412e8db5-13&pdp_ext_f=%7B%22sku_id%22%3A%2212000026568725011%22%7D&pdp_npi=2%40dis%21USD%217.1%217.1%21%21%21%21%21%4021031a5516674805922344612ea9c5%2112000026568725011%21sea&curPageLogUid=5BHzR0rIdiJ1; Item Type: IC
footprint 68-QFN-(7x7)
part A pins: 8 FB2, 9 SW2, 10 VCC2, 11 VCC1, 12 SW1, 13 FB1, 24 VCC3, 25 SW3, 26 VBUCK3, 27 FB3, 64 FB4, 65 SW4, 66 VCC4
part B pins: 14 LRCLK, 15 BCLK, 16 MCLK, 17 SDI, 18 SDO/PDMDATA, 19 PDMCLK, 32 SPKP_OUT, 33 VCC_SPK_HP, 34 SPKN_OUT, 35 VCC_CPVSS, 36 CPN, 37 CPP, 38 VCC_CPVDD, 39 HPL_OUT, 40 HP_SNS, 41 HPR_OUT, 42 MICIN, 43 MICIP, 44 VCC_1P8A, 48 VCC_1P8D
part C pins: 1 SCL, 2 SDA, 7 INT, 45 VCC_RTC, 46 VREF, 47 GNDREF, 49 SLEEP, 50 XIN, 51 XOUT, 52 PWRON, 56 BATDIV, 60 EXT_EN, 61 VDC, 62 SNSP, 63 SNSN, 67 RESETB, 68 CLK32K, 69 GND
part D pins: 3 LDO7, 4 VCC7, 5 LDO8, 6 LDO9, 20 LDO3, 21 LDO2, 22 VCC5, 23 LDO1, 28 LDO4, 29 LDO5, 30 VCC6, 31 LDO6, 53 SW5, 54 VCC9, 55 SWOUT1, 57 VCC8, 58 SWOUT2, 59 FB5

## RK860-2
designator U?
Power Management IC; Manufacturer: Rockchip; Manufacturer Part Number: RK-860; Package: WLCSP20; LCSC Part Number: *; Item Type: IC; ComponentLink1Description: Rutronik; ComponentLink1URL: https://www.rutronik24.com/product/rockchip/rk860-2/18760320.html?emcs0=10&emcs1=null&emcs2=&emcs3=18760320
footprint WLCSP-20 (2.05x1.65) 0.4mm
pins: A1 VSEL, A2 EN, A3 SCL, A4 VOUT, B1 SDA, B2 GND, B3 GND, B4 AGND, C1 GND, C2 GND, C3 GND, C4 GND, D1 VIN, D2 VIN, D3 LX, D4 LX, E1 VIN, E2 VIN, E3 LX, E4 LX